# Altium integrated library 3296W-1-503LF.IntLib: 1 symbol
Pins are listed as number, name and electrical type; pins without a type are passive.

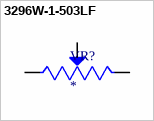
[diagram p0: symbol 3296W-1-503LF]

## 3296W-1-503LF
designator VR?
Trimmer,Cermet,Rest 50 Kilohms,PCB,Pwr-Rtg 0.5W,Dim 0.375InLx0.19InWx0.395InH | Bourns 3296W-1-503LF; SnapEDA_Link: https://www.snapeda.com/parts/3296W-1-503LF/Bourns/view-part/?ref=snap; Package: NON STANDARD-3 Bourns; Value: *; MF: Bourns; MP: 3296W-1-503LF; Check_prices: https://www.snapeda.com/parts/3296W-1-503LF/Bourns/view-part/?ref=eda
footprint TRIM_3296W-1-503LF
pins: 1 CCW, 2 WIPER, 3 CW